# Altium schematic symbol library buck.SchLib: 16 symbols
Pins are listed as number, name and electrical type; pins without a type are passive.

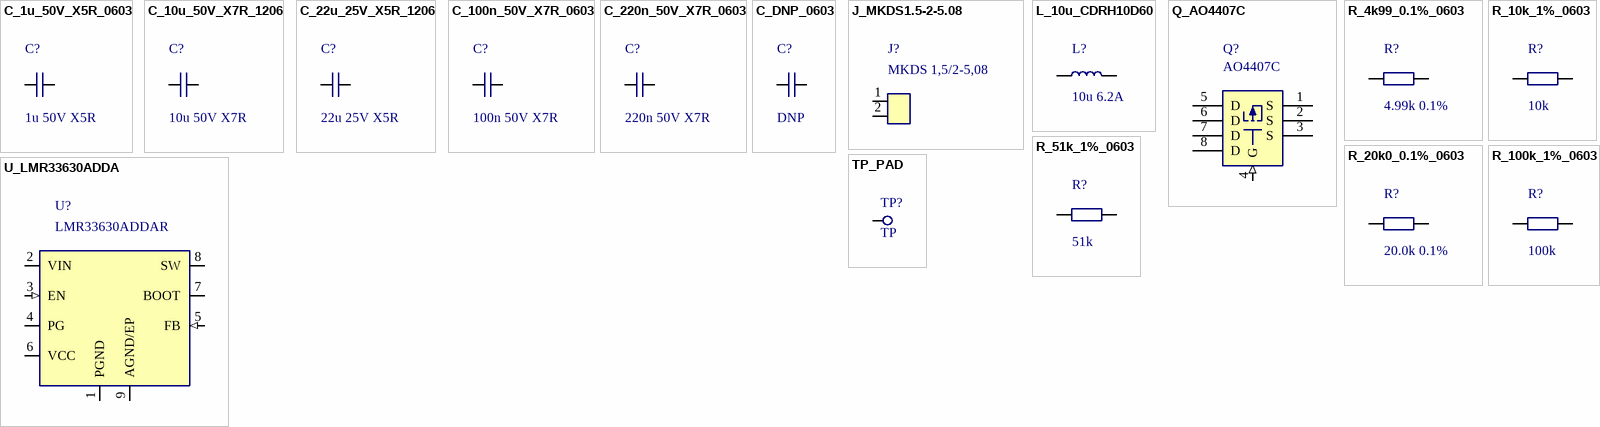
[diagram p0: symbols C_1u_50V_X5R_0603 to U_LMR33630ADDA]

## C_1u_50V_X5R_0603
designator C?, comment 1u 50V X5R
CVCC: 1 uF 50 V X5R 0603; Manufacturer: Samsung; MPN: CL10A105KB8NNNC; Value: 1u 50V X5R; LCSC: C15849; JLCPCB Type: Basic; Datasheet: CL10A105KB8NNNC_C15849.pdf
footprint CAPC1608_0603
pins: 1, 2

## C_10u_50V_X7R_1206
designator C?, comment 10u 50V X7R
CIN: 10 uF 50 V X7R 10% 1206; Manufacturer: FH; MPN: 1206B106K500NT; Value: 10u 50V X7R; LCSC: C303950; JLCPCB Type: Extended; Datasheet: 1206B106K500NT_C303950.pdf
footprint CAPC3216_1206
pins: 1, 2

## C_22u_25V_X5R_1206
designator C?, comment 22u 25V X5R
COUT: 22 uF 25 V X5R 10% 1206; Manufacturer: Samsung; MPN: CL31A226KAHNNNE; Value: 22u 25V X5R; LCSC: C12891; JLCPCB Type: Basic; Datasheet: CL31A226KAHNNNE_C12891.pdf
footprint CAPC3216_1206
pins: 1, 2

## C_100n_50V_X7R_0603
designator C?, comment 100n 50V X7R
CBOOT / HF bypass: 100 nF 50 V X7R 0603; Manufacturer: YAGEO; MPN: CC0603KRX7R9BB104; Value: 100n 50V X7R; LCSC: C14663; JLCPCB Type: Basic; Datasheet: CC0603KRX7R9BB104_C14663.pdf
footprint CAPC1608_0603
pins: 1, 2

## C_220n_50V_X7R_0603
designator C?, comment 220n 50V X7R
CHF: 220 nF 50 V X7R 0603; Manufacturer: YAGEO; MPN: CC0603KRX7R9BB224; Value: 220n 50V X7R; LCSC: C107083; JLCPCB Type: Extended; Datasheet: CC0603KRX7R9BB224_C107083.pdf
footprint CAPC1608_0603
pins: 1, 2

## C_DNP_0603
designator C?, comment DNP
CFF footprint only, do not populate (lmr33630 Table 9-2: CFF open); Value: DNP; Manufacturer: -; MPN: -; LCSC: -; JLCPCB Type: -; Datasheet: -
footprint CAPC1608_0603
pins: 1, 2

## J_MKDS1.5-2-5.08
designator J?, comment MKDS 1,5/2-5,08
Screw terminal 2-pos 5.08 mm, 17.5 A, 250 V; Manufacturer: Phoenix Contact; MPN: 1715721; Value: MKDS 1,5/2-5,08; LCSC: C480516; JLCPCB Type: Extended (hand-soldered, not in SMT order); Datasheet: 1715721_C480516.pdf
footprint TB_MKDS1.5-2-5.08
pins: 1, 2

## L_10u_CDRH10D60
designator L?, comment 10u 6.2A
10 uH 20%, DCR 17 mOhm +/-30%, Isat 6.2 A, Itemp 6.9 A, shielded, AEC-Q200; Manufacturer: Sumida; MPN: CDRH10D60BT150NP-100MC; Value: 10u 6.2A; LCSC: C2594362; JLCPCB Type: Extended; Datasheet: CDRH10D60BT150NP-100MC_C2594362.pdf
footprint IND_CDRH10D60
pins: 1, 2

## Q_AO4407C
designator Q?, comment AO4407C
P-MOSFET -30 V, VGS +/-25 V, RDS(on) < 11.5 mOhm @ -10 V, < 18.5 mOhm @ -4.5 V, SO-8 (datasheet Preliminary); Manufacturer: Alpha & Omega Semicon; Value: AO4407C; MPN: AO4407C; LCSC: C469397; JLCPCB Type: Extended; Datasheet: AO4407C_C469397.pdf
footprint SOIC8_MS012
pins: 1 S, 2 S, 3 S, 4 G (in), 5 D, 6 D, 7 D, 8 D

## R_4k99_0.1%_0603
designator R?, comment 4.99k 0.1%
RFBB: 4.99 kOhm 0.1% 25ppm 100mW 0603 thin film; Manufacturer: RESI; MPN: PTFR0603B4K99P9; Value: 4.99k 0.1%; LCSC: C5382597; JLCPCB Type: Extended; Datasheet: PTFR0603B4K99P9_C5382597.pdf
footprint RESC1608_0603
pins: 1, 2

## R_10k_1%_0603
designator R?, comment 10k
10 kOhm 1% 100mW 0603 (RENB, MOSFET gate); Manufacturer: UNI-ROYAL; MPN: 0603WAF1002T5E; Value: 10k; LCSC: C25804; JLCPCB Type: Basic; Datasheet: 0603WAF1002T5E_C25804.pdf
footprint RESC1608_0603
pins: 1, 2

## R_20k0_0.1%_0603
designator R?, comment 20.0k 0.1%
RFBT: 20.0 kOhm 0.1% 25ppm 100mW 0603 thin film; Manufacturer: RESI; MPN: PTFR0603B20K0P9; Value: 20.0k 0.1%; LCSC: C328424; JLCPCB Type: Extended; Datasheet: PTFR0603B20K0P9_C328424.pdf
footprint RESC1608_0603
pins: 1, 2

## R_51k_1%_0603
designator R?, comment 51k
RENT: 51 kOhm 1% 100mW 0603; Manufacturer: UNI-ROYAL; MPN: 0603WAF5102T5E; Value: 51k; LCSC: C23196; JLCPCB Type: Basic; Datasheet: 0603WAF5102T5E_C23196.pdf
footprint RESC1608_0603
pins: 1, 2

## R_100k_1%_0603
designator R?, comment 100k
PG pull-up 100 kOhm 1% 0603; Manufacturer: UNI-ROYAL; MPN: 0603WAF1003T5E; Value: 100k; LCSC: C25803; JLCPCB Type: Basic; Datasheet: 0603WAF1003T5E_C25803.pdf
footprint RESC1608_0603
pins: 1, 2

## TP_PAD
designator TP?, comment TP
Test pad 1.5 mm; Value: TP; Manufacturer: -; MPN: -; LCSC: -; JLCPCB Type: - (copper pad, no part); Datasheet: -
footprint TP_PAD_D1.5
pins: 1

## U_LMR33630ADDA
designator U?, comment LMR33630ADDAR
Sync buck 3.8-36 V in, 3 A, 400 kHz (A), HSOIC-8 PowerPAD; EP = AGND; Manufacturer: Texas Instruments; Value: LMR33630ADDAR; MPN: LMR33630ADDAR; LCSC: C841384; JLCPCB Type: Extended; Datasheet: lmr33630.pdf
footprint LMR33630_HSOIC8_DDA
pins: 1 PGND (power), 2 VIN (power), 3 EN (in), 4 PG (oc), 5 FB (in), 6 VCC, 7 BOOT, 8 SW, 9 AGND/EP (power)